# Altium schematic symbol library IRM-10-5.SchLib: 1 symbol
Pins are listed as number, name and electrical type; pins without a type are passive.

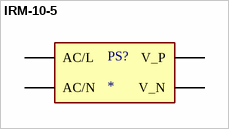
[diagram p0: symbol IRM-10-5]

## IRM-10-5
designator PS?
Enclosed AC DC Converters 1 Output 5V - - - 2A 85 ~ 305 VAC, 120 ~ 430 VDC Input; MF: MEAN WELL; MP: IRM-10-5; Value: *; Purchase-URL: https://pricing.snapeda.com/search/part/IRM-10-5/?ref=eda; Package: None; Check_prices: https://www.snapeda.com/parts/IRM-10-5/Mean+Well/view-part/?ref=eda; SnapEDA_Link: https://www.snapeda.com/parts/IRM-10-5/Mean+Well/view-part/?ref=snap; Price: None; Availability: In Stock
footprint CONV_IRM-10-5
pins: 1 AC/N (power), 2 AC/L (power), 3 V_N (power), 4 V_P (power)